# Altium footprint library Module.PcbLib: 28 footprints (part 1 of 2)
Each footprint in its own frame and in the unit in brackets; x right, y up, seen from the top. Pads: shape width x height; smd on the part's side, far side on the other; paste and mask are expansions set on the pad; w line width, h text height; cw(c..) or ccw(c..) is an arc to the next point about the centre after c.
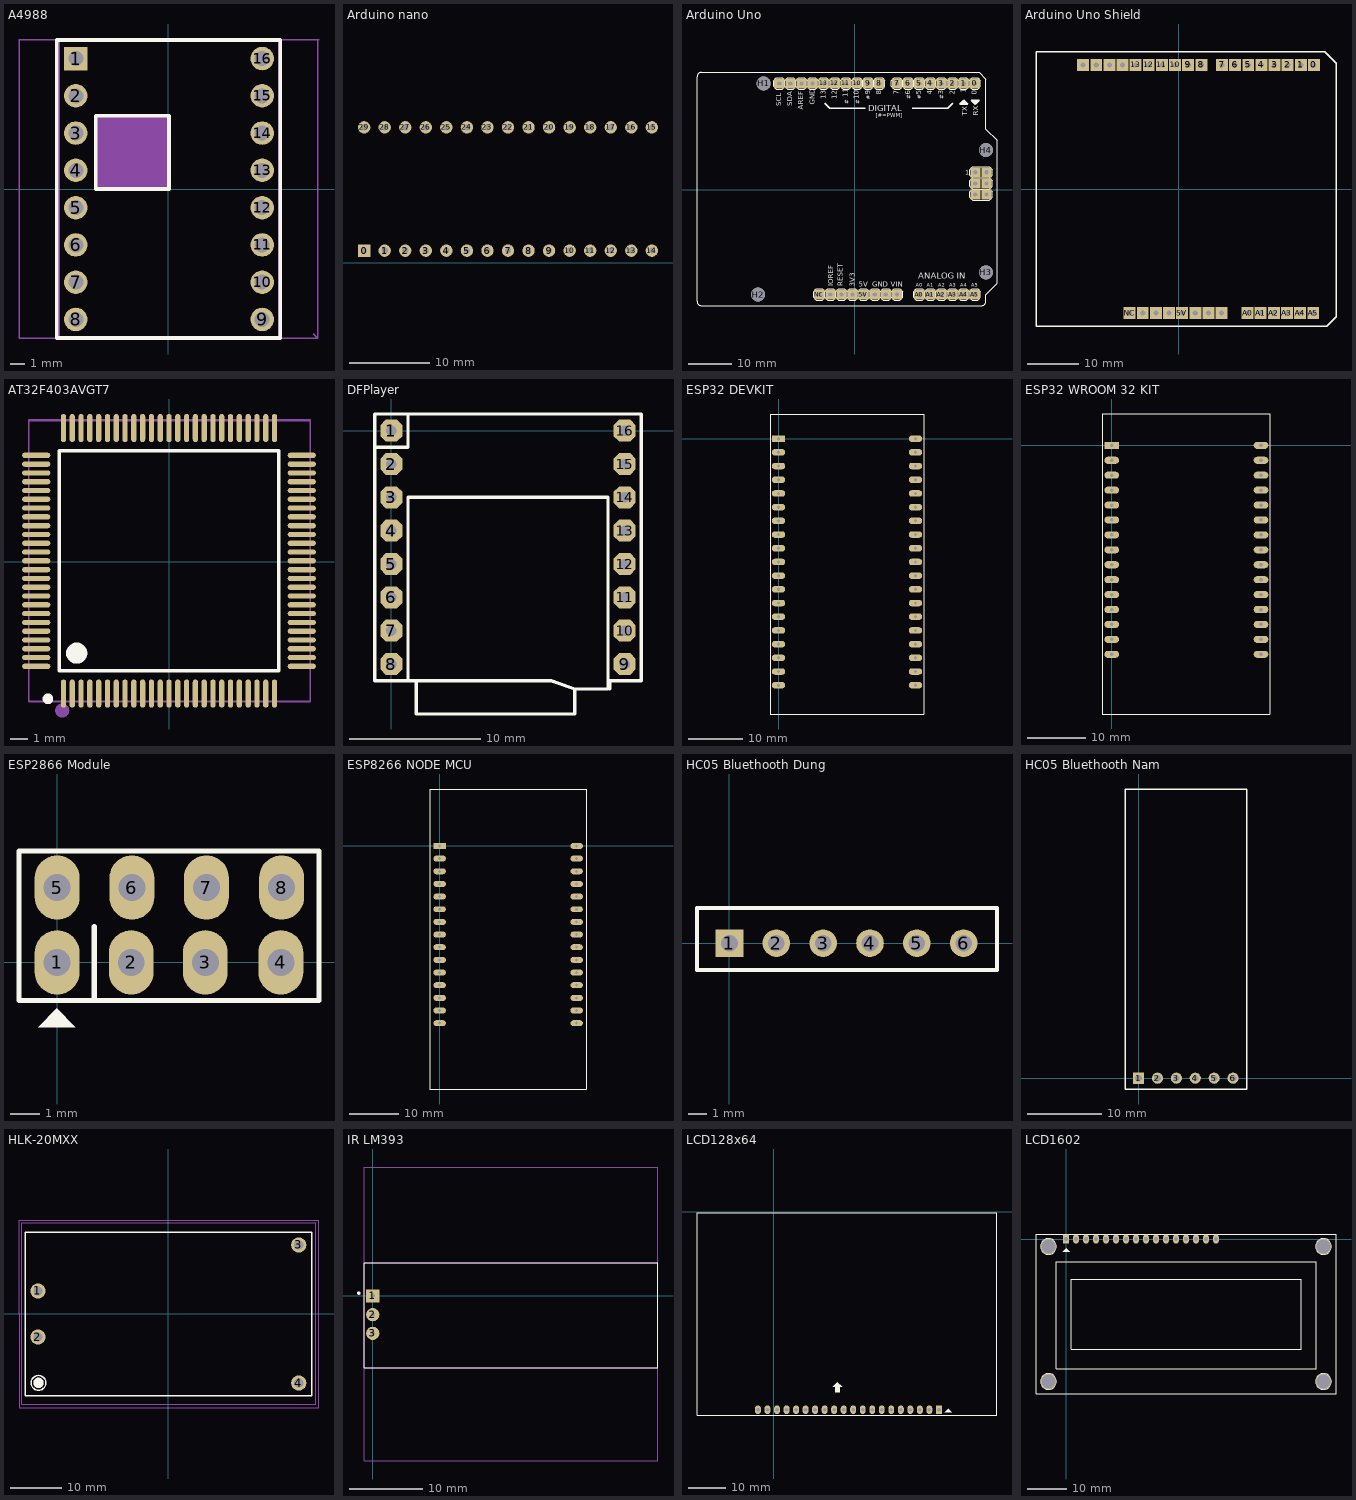
[diagram p0: the footprints below, top view; thin cyan lines are the x and y axes]

## A4988 [mm]
pads (16):
  rect 1.6x1.6 hole 1.02 paste-2539.97 mask+0.05: 1(-6.31,8.89)
  round 1.6 hole 1.02 paste-2539.97 mask+0.05: 2(-6.31,6.35) 3(-6.31,3.81) 4(-6.31,1.27) 5(-6.31,-1.27) 6(-6.31,-3.81) 7(-6.31,-6.35) 8(-6.31,-8.89) 9(6.39,-8.89) 10(6.39,-6.35) 11(6.39,-3.81) 12(6.39,-1.27) 13(6.39,1.27) 14(6.39,3.81) 15(6.39,6.35) 16(6.39,8.89)
Top Overlay:
  lines w0.254: -7.62,-10.16 7.62,-10.16 7.62,10.16 -7.62,10.16 -7.62,-10.16 ; -4.96,0 -4.96,5 0.04,5 0.04,0 -4.96,0
Top Assembly:
  lines w0.1: -7.455,-10.135 7.505,-10.135 7.505,10.185 -7.455,10.185 -7.455,-10.135
the flat protection:
  lines w0.1: 9.855,-9.855 10.185,-10.185 ; 10.185,10.185 10.185,-10.185 ; 10.262,10.185 -10.185,10.185 -10.185,-10.185 10.185,-10.185
  text "+" at -0.483,-0.813 h1.52
Mechanical 15:
  region: -4.86,4.9 -4.86,0.1 -0.06,0.1 -0.06,4.9
Mechanical 29:
  text ".Designator" at -3.454,6.206 h1.52
3D body "A4988-Stepper-Driver-WithPins.stp": height 5.7, standoff -5.5, extent -7.455,-10.135 7.505,10.185

## Arduino nano [mil] "arduino nano"
height 1700
pads (30):
  rect 60x60 hole 30: 0(160,60)
  round 60 hole 30: 1(260,60) 2(360,60) 3(460,60) 4(560,60) 5(660,60) 6(760,60) 7(860,60) 8(960,60) 9(1060,60) 10(1160,60) 11(1260,60) 12(1360,60) 13(1460,60) 14(1560,60) 15(1560,660) 16(1460,660) 17(1360,660) 18(1260,660) 19(1160,660) 20(1060,660) 21(960,660) 22(860,660) 23(760,660) 24(660,660) 25(560,660) 26(460,660) 27(360,660) 28(260,660) 29(160,660)
3D body "Arduino_NANO_CH340.step": height 507.32, standoff -49.21, extent -25,10 1714.76,710

## Arduino Uno [mm]
pads (42):
  rect 2.3x2.3 hole 1: 0(27.44,24.26) 1(24.9,24.26) 2(22.36,24.26) 3(19.82,24.26) 3V3(-0.5,-24) 4(17.28,24.26) 5(14.74,24.26) 5V(2.04,-24) 6(12.2,24.26) 7(9.66,24.26) 8(5.596,24.26) 9(3.056,24.26) 10(0.516,24.26) 11(-2.024,24.26) 12(-4.564,24.26) 13(-7.104,24.26) A0(14.74,-24) A1(17.28,-24) A2(19.82,-24) A3(22.36,-24) A4(24.9,-24) A5(27.44,-24) AREF(-12.184,24.26) GND1(4.58,-24) GND2(7.12,-24) GND3(-9.644,24.26) ICSP1(27.567,3.94) ICSP2(30.107,3.94) ICSP3(27.567,1.4) ICSP4(30.107,1.4) ICSP5(27.567,-1.14) ICSP6(30.107,-1.14) IOREF(-5.58,-24) NC(-8.12,-24) RESET(-3.04,-24) SCL(-17.264,24.26) SDA(-14.724,24.26) Vin(9.66,-24)
  round 3.2 hole 3.2: H1(-20.82,24.26) H2(-22.09,-24) H3(29.98,-18.92) H4(29.98,9.02)
Bottom Layer:
  lines w0.305: -14.724,24.26 -14.47,24.26
Top Overlay:
  drawing of 281 lines, arcs and shapes, not listed
  text "5V" at 0.897,-22.222 h1.21
  text "A0" at 13.953,-22.197 h0.86
  text "ANALOG IN" at 14.486,-20.444 h1.42
  text "AREF" at -11.814,18.203 h1.21
  text "1" at 25.205,3.407 h1.08
  text "GND" at -9.172,19.386 h1.21
  text "RESET" at -2.786,-22.095 h1.21
  text "3V3" at 0.008,-22.222 h1.21
  text "A1" at 16.493,-22.197 h0.86
  text "A2" at 19.033,-22.197 h0.86
  text "A3" at 21.573,-22.197 h0.86
  text "A4" at 24.113,-22.197 h0.86
  text "A5" at 26.653,-22.197 h0.86
  text "VIN" at 8.263,-22.222 h1.21
  text "GND" at 3.97,-22.222 h1.21
  text "IOREF" at -4.945,-22.095 h1.21
  text "DIGITAL" at 3.107,17.885 h1.42
  text "TX" at 25.662,16.919 h1.21
  text "RX" at 28.202,16.894 h1.21
  text "13" at -6.657,20.669 h1.21
  text "12" at -4.117,20.669 h1.21
  text "11" at -1.577,21.072 h1.21
  text "10" at 0.963,20.669 h1.21
  text "9" at 3.503,21.676 h1.21
  text "8" at 6.043,21.676 h1.21
  text "7" at 10.107,21.676 h1.21
  text "6" at 12.647,21.676 h1.21
  text "5" at 15.187,21.676 h1.21
  text "4" at 17.727,21.676 h1.21
  text "3" at 20.267,21.676 h1.21
  text "2" at 22.807,21.676 h1.21
  text "1" at 25.347,22.079 h1.21
  text "0" at 27.887,21.676 h1.21
  text "[#=PWM]" at 4.834,16.513 h0.95
  text "#" at -1.4,19.5 h0.95
  text "#" at 1.1,19.5 h0.95
  text "#" at 15.2,20.6 h0.95
  text "#" at 20.3,20.6 h0.95
  text "#" at 12.8,20.6 h0.95
  text "#" at 3.6,20.5 h0.95
  text "SCL" at -16.8,19.1 h1.21
  text "SDA" at -14.271,19.087 h1.21

## Arduino Uno Shield [mm]
pads (32):
  rect 2.3x2.3 hole 1: 0(26.1,24) 1(23.56,24) 2(21.02,24) 3(18.48,24) 3V3(-1.92,-24) 4(15.94,24) 5(13.4,24) 5V(0.62,-24) 6(10.86,24) 7(8.32,24) 8(4.32,24) 9(1.78,24) 10(-0.76,24) 11(-3.3,24) 12(-5.84,24) 13(-8.38,24) A0(13.26,-24) A1(15.8,-24) A2(18.34,-24) A3(20.88,-24) A4(23.42,-24) A5(25.96,-24) AREF(-13.46,24) GND1(3.16,-24) GND2(5.7,-24) GND3(-10.92,24) IOREF(-7,-24) NC(-9.54,-24) RESET(-4.46,-24) SCL(-18.54,24) SDA(-16,24) Vin(8.24,-24)
Top Overlay:
  lines w0.254: -27.64,-26.5 28.56,-26.5 30.36,-24.7 30.36,-6.9 30.36,24.3 28.16,26.5 -27.64,26.5 -27.64,-26.5

## AT32F403AVGT7 [mm]
pads (100):
  oval 0.3x1.6 smd paste+0 mask+0.051: 1(-6.025,-7.51) 2(-5.526,-7.51) 3(-5.025,-7.51) 4(-4.526,-7.51) 5(-4.025,-7.51) 6(-3.526,-7.51) 7(-3.025,-7.51) 8(-2.526,-7.51) 9(-2.025,-7.51) 10(-1.526,-7.51) 11(-1.025,-7.51) 12(-0.525,-7.51) 13(-0.025,-7.51) 14(0.475,-7.51) 15(0.975,-7.51) 16(1.475,-7.51) 17(1.975,-7.51) 18(2.475,-7.51) 19(2.975,-7.51) 20(3.475,-7.51) 21(3.975,-7.51) 22(4.475,-7.51) 23(4.975,-7.51) 24(5.475,-7.51) 25(5.975,-7.51) 51(5.975,7.59) 52(5.475,7.59) 53(4.975,7.59) 54(4.475,7.59) 55(3.975,7.59) 56(3.475,7.59) 57(2.975,7.59) 58(2.475,7.59) 59(1.975,7.59) 60(1.475,7.59) 61(0.975,7.59) 62(0.475,7.59) 63(-0.025,7.59) 64(-0.525,7.59) 65(-1.025,7.59) 66(-1.526,7.59) 67(-2.025,7.59) 68(-2.526,7.59) 69(-3.025,7.59) 70(-3.526,7.59) 71(-4.025,7.59) 72(-4.526,7.59) 73(-5.025,7.59) 74(-5.526,7.59) 75(-6.025,7.59)
  oval 1.6x0.3 smd paste+0 mask+0.051: 26(7.524,-5.96) 27(7.524,-5.46) 28(7.524,-4.96) 29(7.524,-4.46) 30(7.524,-3.96) 31(7.524,-3.46) 32(7.524,-2.96) 33(7.524,-2.46) 34(7.524,-1.96) 35(7.524,-1.46) 36(7.524,-0.96) 37(7.524,-0.46) 38(7.524,0.04) 39(7.524,0.54) 40(7.524,1.04) 41(7.524,1.54) 42(7.524,2.04) 43(7.524,2.54) 44(7.524,3.04) 45(7.524,3.54) 46(7.524,4.04) 47(7.524,4.54) 48(7.524,5.04) 49(7.524,5.54) 50(7.524,6.04) 76(-7.575,6.04) 77(-7.575,5.54) 78(-7.575,5.04) 79(-7.575,4.54) 80(-7.575,4.04) 81(-7.575,3.54) 82(-7.575,3.04) 83(-7.575,2.54) 84(-7.575,2.04) 85(-7.575,1.54) 86(-7.575,1.04) 87(-7.575,0.54) 88(-7.575,0.04) 89(-7.575,-0.46) 90(-7.575,-0.96) 91(-7.575,-1.46) 92(-7.575,-1.96) 93(-7.575,-2.46) 94(-7.575,-2.96) 95(-7.575,-3.46) 96(-7.575,-3.96) 97(-7.575,-4.46) 98(-7.575,-4.96) 99(-7.575,-5.46) 100(-7.575,-5.96)
Top Overlay:
  lines w0.2: -6.275,-6.21 6.225,-6.21 6.225,6.29 -6.275,6.29 -6.275,-6.21
  lines w0.3: -6.909,-7.656 ccw(c-6.908,-7.806) -6.906,-7.656
  lines w0.6: -5.276,-4.911 ccw(c-5.273,-5.211) -5.271,-4.911
Top Assembly:
  lines w0.1: -8,-7.949 8,-7.949 8,8.051 -8,8.051 -8,-7.949
the flat protection:
  circle w0.4: c-6.096,-8.469 r0.2
  lines w0.1: -8.001,-7.976 -8.001,8.026 8.001,8.026 8.001,-7.976 -8.001,-7.976
  text "+" at -0.305,-0.463 h1.52
Mechanical 29:
  text ".Designator" at -3.302,1.329 h1.52
3D body "STM32F103VGT6.stp": height 1.6, standoff 0, extent -8,-7.949 8,8.051

## DFPlayer [mil]
pads (16):
  oct 66x66 / inner oct 60x60 / far side oct 66x66 hole 31.5: 1(0,0) 2(0,-100) 3(0,-200) 4(0,-300) 5(0,-400) 6(0,-500) 7(0,-600) 8(0,-700) 9(700,-700) 10(700,-600) 11(700,-500) 12(700,-400) 13(700,-300) 14(700,-200) 15(700,-100) 16(700,0)
Top Overlay:
  lines w10: -50,-50 50,-50 50,50 ; 50,-750 50,-200 650,-200 650,-775 550,-775 ; 655,-775 655,-765 655,-750 750,-750 750,50 -50,50 -50,-750 75,-750 ; 75,-750 480,-750 550,-775 ; 75,-750 75,-850 550,-850 550,-775
Mechanical 5:
the flat protection:
  lines w5: 50,-750 -50,-750 -50,50 750,50 750,-750 650,-750 ; 50,-750 50,-200 650,-200 650,-750 ; 50,-750 75,-750 ; 75,-750 475,-750 550,-775 ; 75,-750 75,-850 550,-850 550,-775 ; 550,-775 650,-775 650,-750
3D body "DFPlayer Mini Assem v1.step": height 418.11, standoff -22.83, extent -59.44,-859.17 759.46,64.45

## ESP32 DEVKIT [mm]
pads (38):
  rect 2.5x1.2 hole 0.6: 1(0,0)
  oval 2.5x1.2 hole 0.6: 2(0,-2.54) 3(0,-5.08) 4(0,-7.62) 5(0,-10.16) 6(0,-12.7) 7(0,-15.24) 8(0,-17.78) 9(0,-20.32) 10(0,-22.86) 11(0,-25.4) 12(0,-27.94) 13(0,-30.48) 14(0,-33.02) 15(0,-35.56) 16(0,-38.1) 17(0,-40.64) 18(0,-43.18) 19(0,-45.72) 20(25.4,-45.72) 21(25.4,-43.18) 22(25.4,-40.64) 23(25.4,-38.1) 24(25.4,-35.56) 25(25.4,-33.02) 26(25.4,-30.48) 27(25.4,-27.94) 28(25.4,-25.4) 29(25.4,-22.86) 30(25.4,-20.32) 31(25.4,-17.78) 32(25.4,-15.24) 33(25.4,-12.7) 34(25.4,-10.16) 35(25.4,-7.62) 36(25.4,-5.08) 37(25.4,-2.54) 38(25.4,0)
Top Overlay:
  lines w0.2: -1.524,-51.054 -1.524,4.572 13.335,4.572 26.924,4.572 26.924,-51.054 -1.524,-51.054
3D body "Goouuu-ESP32 Development Board.STEP": height 9.68, standoff -3.46, extent -1.27,-50.99 26.67,4.59

## ESP32 WROOM 32 KIT [mm]
pads (30):
  rect 2.5x1.2 hole 0.6: 1(0,0)
  oval 2.5x1.2 hole 0.6: 2(0,-2.54) 3(0,-5.08) 4(0,-7.62) 5(0,-10.16) 6(0,-12.7) 7(0,-15.24) 8(0,-17.78) 9(0,-20.32) 10(0,-22.86) 11(0,-25.4) 12(0,-27.94) 13(0,-30.48) 14(0,-33.02) 15(0,-35.56) 16(25.4,-35.56) 17(25.4,-33.02) 18(25.4,-30.48) 19(25.4,-27.94) 20(25.4,-25.4) 21(25.4,-22.86) 22(25.4,-20.32) 23(25.4,-17.78) 24(25.4,-15.24) 25(25.4,-12.7) 26(25.4,-10.16) 27(25.4,-7.62) 28(25.4,-5.08) 29(25.4,-2.54) 30(25.4,0)
Top Overlay:
  lines w0.2: -1.651,-45.72 -1.651,5.334 13.335,5.334 26.924,5.334 26.924,-45.72 -1.651,-45.72
3D body "ESP-WROOM32.STEP": height 10.49, standoff -1.91, extent -1.651,-45.596 26.849,5.334

## ESP2866 Module [mil]
pads (8):
  oval 60x86 hole 36: 1(0,0) 2(99,0) 3(198,0) 4(299,0) 5(0,100) 6(100,100) 7(199.5,100) 8(300,100)
Top Overlay:
  region: -0.5,-61.5 -25.5,-86.5 24.5,-86.5
  lines w7: 49.5,-50.5 49.5,47.5 ; -51,-51 350,-51 350,149 -51,149 -51,49 -51,-51
3D body "User Library-Wi07C.STEP": height 381.4, standoff -78.35, extent -137.44,-817.38 433.43,159

## ESP8266 NODE MCU [mm]
pads (30):
  rect 2.5x1.2 hole 0.6: 1(0,0)
  oval 2.5x1.2 hole 0.6: 2(0,-2.54) 3(0,-5.08) 4(0,-7.62) 5(0,-10.16) 6(0,-12.7) 7(0,-15.24) 8(0,-17.78) 9(0,-20.32) 10(0,-22.86) 11(0,-25.4) 12(0,-27.94) 13(0,-30.48) 14(0,-33.02) 15(0,-35.56) 16(27.5,-35.56) 17(27.5,-33.02) 18(27.5,-30.48) 19(27.5,-27.94) 20(27.5,-25.4) 21(27.5,-22.86) 22(27.5,-20.32) 23(27.5,-17.78) 24(27.5,-15.24) 25(27.5,-12.7) 26(27.5,-10.16) 27(27.5,-7.62) 28(27.5,-5.08) 29(27.5,-2.54) 30(27.5,0)
Top Overlay:
  lines w0.2: -2.032,-48.768 29.464,-48.768 29.464,11.43 14.385,11.43 -2.032,11.43 -2.032,-48.768
3D body "ESP8266.STEP": height 9.03, standoff -1.11, extent -2.036,-48.677 29.464,11.303

## HC05 Bluethooth Dung [mm] "Connector; Header; 6 Position"
height 1.14
pads (6):
  rect 1.5x1.5 hole 0.9: 1(0,0)
  round 1.5 hole 0.9: 2(2.54,0) 3(5.08,0) 4(7.62,0) 5(10.16,0) 6(12.7,0)
Top Overlay:
  lines w0.2: -1.763,-1.455 14.511,-1.455 14.511,1.905 -1.763,1.905 -1.763,-1.455
3D body "female_header_a-bl254-eg-g06d.stp": height 7.92, standoff -3.78, extent -1.395,-1.237 14.095,1.263
3D body "User Library-blue.STEP": height 38, standoff -1.42, extent -1.649,-3.556 14.351,1.239

## HC05 Bluethooth Nam [mm] "Connector; Header; 6 Position"
height 1.14
pads (6):
  rect 1.5x1.5 hole 0.9: 1(0,0)
  round 1.5 hole 0.9: 2(2.54,0) 3(5.08,0) 4(7.62,0) 5(10.16,0) 6(12.7,0)
Top Overlay:
  lines w0.2: -1.763,-1.455 14.511,-1.455 14.511,38.862 -1.763,38.862 -1.763,-1.455
3D body "User Library-blue.STEP": height 4.05, standoff -0.75, extent -1.522,-0.635 14.478,38.784

## HLK-20MXX [mm]
pads (4):
  round 3 hole 1.8 paste-2539.97 mask+0.051: 1(-25.5,4.5) 2(-25.5,-4.5) 3(25.5,13.5) 4(25.5,-13.5)
Top Overlay:
  circle w1: c-25.4,-13.462 r0.5
  circle w0.254: c-25.4,-13.462 r1.437
  lines w0.254: -28,-16 -28,16 28,16 28,-16 -28,-16
Top Assembly:
  lines w0.1: -28.634,-17.698 -28.634,17.802 28.866,17.802 28.866,-17.698 -28.634,-17.698
the flat protection:
  lines w0.1: -29.21,-18.288 29.464,-18.288 29.464,18.288 -29.21,18.288 -29.21,-18.288
  text "+" at -0.051,-0.082 h0.3
Mechanical 15:
  circle w1: c-25.4,-13.462 r0.5
Mechanical 29:
  text ".Designator" at -3.277,2.751 h1.52
3D body "HLK-20M24.STEP": height 13.55, standoff -15.1, extent -28.634,-17.698 28.866,17.802

## IR LM393 [mm]
pads (3):
  rect 1.8x1.8 hole 0.6: 1(0,0)
  round 1.8 hole 0.6: 2(0,-2.54) 3(0,-5.08)
Top Overlay:
  circle w0.254: c-1.88,0.381 r0.114
  lines w0.1: -1.143,4.445 -1.143,-9.728 38.684,-9.728 38.684,4.47 -1.118,4.47
Top Assembly:
  lines w0.1: -1.129,-9.728 38.671,-9.728 38.671,4.472 -1.129,4.472 -1.129,-9.728
the flat protection:
  lines w0.1: -1.143,-22.377 -1.143,17.475 38.659,17.475 38.659,-22.377 -1.143,-22.377
  text "+" at 18.263,-3.226 h1.52
Mechanical 29:
  text ".Designator" at 15.748,0.389 h1.52
3D body "Infrared Obstacle Detecting Module v4.step": height 4, standoff -6.12, extent -1.129,-9.728 38.671,4.472

## LCD128x64 [mil] "LCD Graphic 128x64, 20 pin"
height 400
pads (20):
  rect 62x90 hole 39: 1(1735,-2080)
  oval 62x90 hole 39: 2(1635,-2080) 3(1535,-2080) 4(1435,-2080) 5(1335,-2080) 6(1235,-2080) 7(1135,-2080) 8(1035,-2080) 9(935,-2080) 10(835,-2080) 11(735,-2080) 12(635,-2080) 13(535,-2080) 14(435,-2080) 15(335,-2080) 16(235,-2080) 17(135,-2080) 18(35,-2080) 19(-65,-2080) 20(-165,-2080)
Top Overlay:
  region: 1832.5,-2072.5 1797.5,-2107.5 1867.5,-2107.5
  region: 670,-1790 620,-1840 645,-1840 645,-1895 695,-1895 695,-1840 720,-1840
  lines w8: -805,-2138 -805,-12 2345,-12 2345,-2138 -805,-2138
3D body "User Library-GRAPHIC LCD WG12864B.STEP": height 275.59, standoff -330.71, extent -804.61,-2137.98 2345,-12

## LCD1602 [mil] "LCD dipslay 16x2, 16 pin"
height 400
pads (20):
  rect 62x90 hole 36: 1(0,0)
  oval 62x90 hole 36: 2(100,0) 3(200,0) 4(300,0) 5(400,0) 6(500,0) 7(600,0) 8(700,0) 9(800,0) 10(900,0) 11(1000,0) 12(1100,0) 13(1200,0) 14(1300,0) 15(1400,0) 16(1500,0)
  round 157.48 hole 137.8: "Hole 0"(-175,-1425) "Hole 0"(-175,-75) "Hole 0"(2575,-1425) "Hole 0"(2575,-75)
Top Overlay:
  circle w7: c-175,-1425 r79.06
  circle w7: c-175,-75 r79.06
  circle w7: c2575,-75 r79.06
  circle w7: c2575,-1425 r79.06
  region: 0,-90 -35,-125 35,-125
  lines w7: -300,-1550 2700,-1550 2700,50 -300,50 -300,-1550 ; -100,-1300 2500,-1300 2500,-225 -100,-225 -100,-1300 ; 50,-1100 2350,-1100 2350,-400 50,-400 50,-1100
3D body "LCD module 16 X 2 backlight.STEP": height 414, standoff -106, extent -314.65,-1360 2854.65,77.01